# Altium integrated library NeoPixel.IntLib: 1 symbol
Pins are listed as number, name and electrical type; pins without a type are passive.

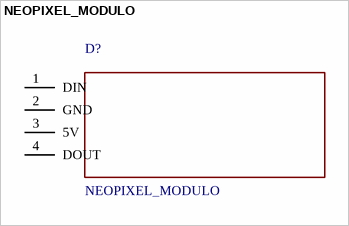
[diagram p0: symbol NEOPIXEL_MODULO]

## NEOPIXEL_MODULO
designator D?
NEOPIXEL_MODULO - simbolo de conexion sin huella; Carnet: 22993; Curso: Digital 2; Proyecto: proyecto 3; Tipo: Modulo externo; sin huella PCB; Pin numbering: Numeracion logica: verificar etiquetas del modulo; Author: Miguel Donis; Revision: 1.0
pins: 1 DIN, 2 GND, 3 5V, 4 DOUT